# Altium footprint library huan_basic.PcbLib: 138 footprints (part 6 of 9)
Each footprint in its own frame and in the unit in brackets; x right, y up, seen from the top. Pads: shape width x height; smd on the part's side, far side on the other; paste and mask are expansions set on the pad; w line width, h text height; cw(c..) or ccw(c..) is an arc to the next point about the centre after c.
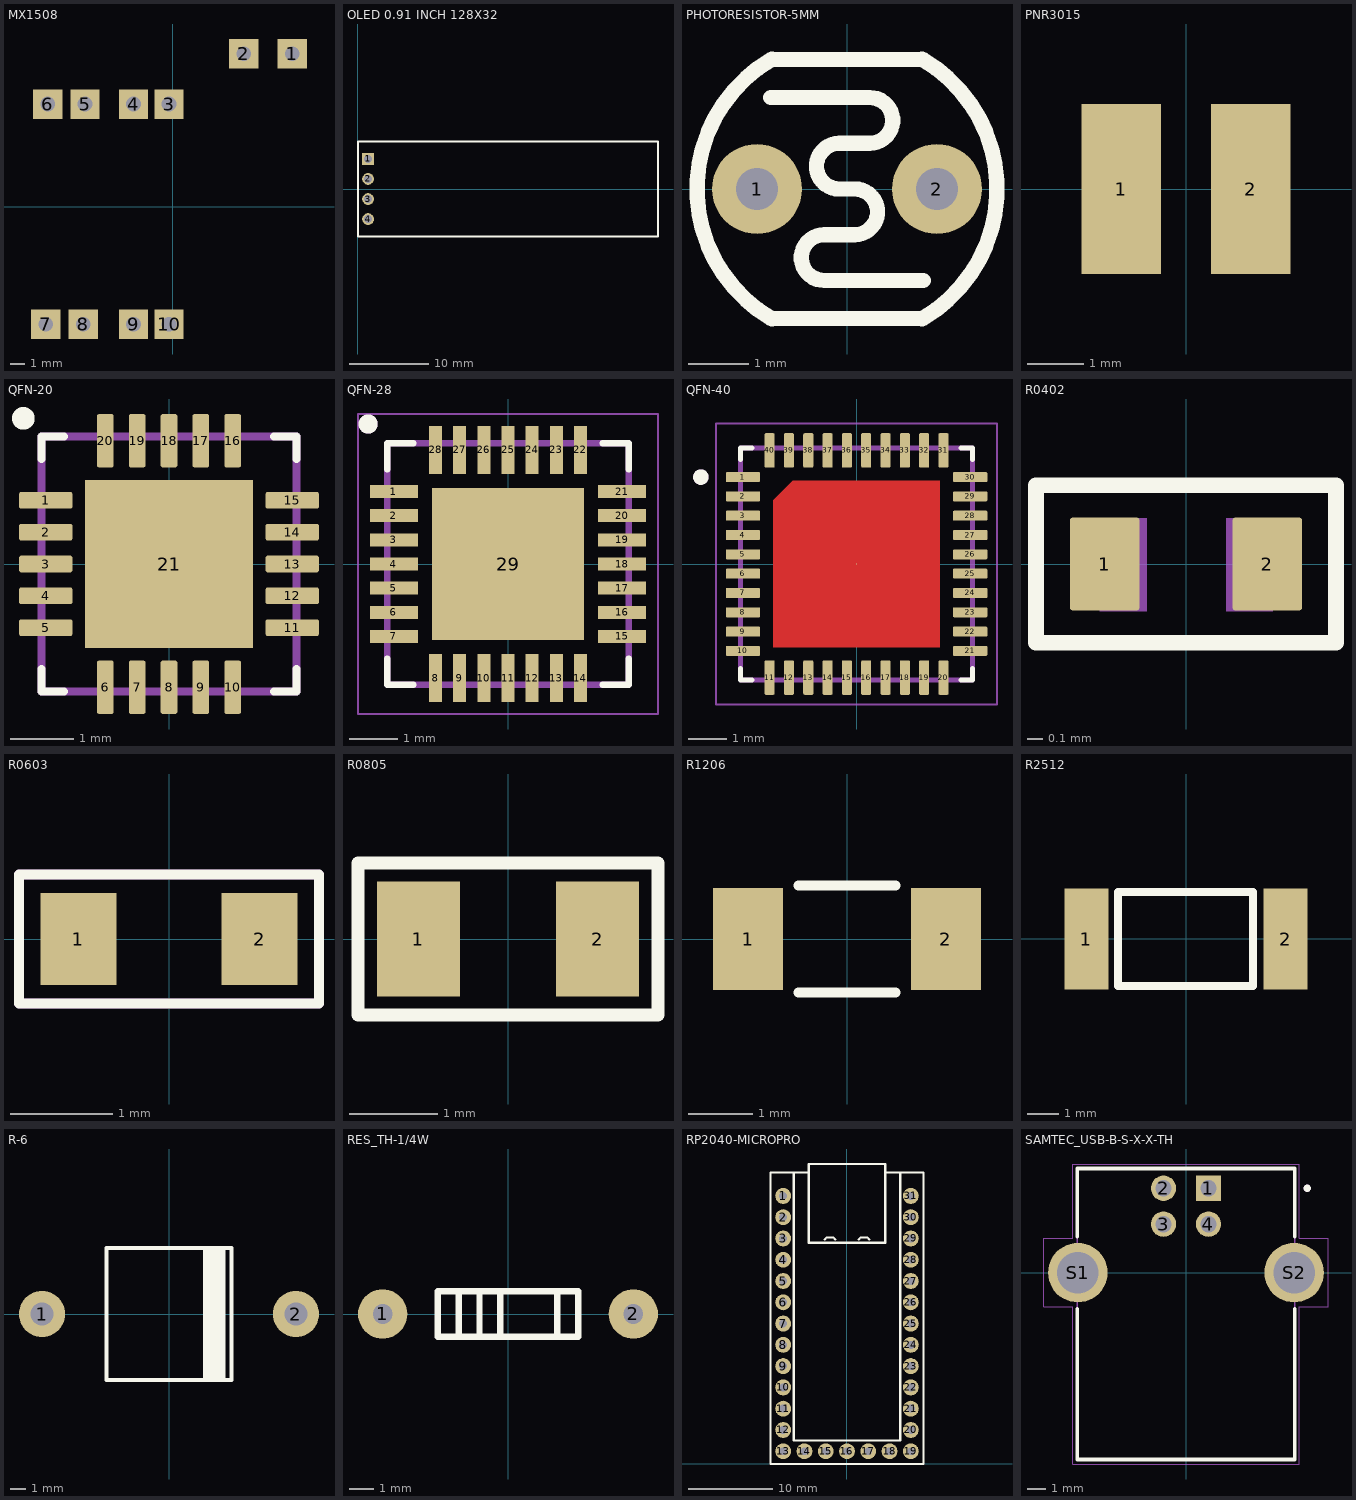
[diagram p5: the footprints below, top view; thin cyan lines are the x and y axes]

## MX1508 [mm]
pads (10):
  rect 2x2 hole 1: 1(8.128,10.414) 2(4.826,10.414) 3(-0.254,6.985) 4(-2.667,6.985) 5(-5.969,6.985) 6(-8.509,6.985) 7(-8.636,-8.001) 8(-6.096,-8.001) 9(-2.667,-8.001) 10(-0.254,-8.001)
3D body "MX1508.STEP": height 7.06, standoff -0.31, extent -10.6,-12.25 10.6,12.25

## OLED 0.91 INCH 128X32 [mm]
pads (4):
  rect 1.5x1.5 hole 1: 1(1.27,3.81)
  round 1.5 hole 1: 2(1.27,1.27) 3(1.27,-1.27) 4(1.27,-3.81)
Top Overlay:
  lines w0.254: 0,-6 0,6 38,6 38,-6 0,-6
3D body "OLED 128 x 32 Display Assembly.step": height 6, standoff -5.26, extent 0,-6 38,6

## PHOTORESISTOR-5MM [mm]
pads (2):
  round 1.5 hole 0.7: 1(-1.5,0) 2(1.5,0)
Top Overlay:
  lines w0.254: -1.27,-2.159 1.25,-2.159 ; -1.27,1.524 0.381,1.524 cw(c0.381,1.143) 0.381,0.762 -0.127,0.762 ccw(c-0.127,0.381) -0.127,0 0.127,0 cw(c0.127,-0.381) 0.127,-0.762 -0.381,-0.762 ccw(c-0.381,-1.143) -0.381,-1.524 1.27,-1.524 ; -1.25,-2.165 cw(c0,0) -1.25,2.165 ; -1.25,2.159 1.27,2.159 ; 1.25,-2.165 ccw(c0,0) 1.25,2.165
3D body "Accurate GL55 (No Glass).step": height 2.2, standoff -1.8, extent -2.55,-2.15 2.55,2.15

## PNR3015 [mm]
pads (2):
  rect 1.4x3 smd: 1(-1.143,0) 2(1.143,0)
3D body "PNR3015 SMD Power Inductor.STEP": height 1.45, standoff 0.09, extent -1.5,-1.5 1.5,1.5

## QFN-20 [mm]
pads (21):
  rrect25% 0.84x0.26 smd: 1(-1.935,1) 2(-1.935,0.5) 3(-1.935,0) 4(-1.935,-0.5) 5(-1.935,-1) 11(1.935,-1) 12(1.935,-0.5) 13(1.935,0) 14(1.935,0.5) 15(1.935,1)
  rrect25% 0.26x0.84 smd: 6(-1,-1.935) 7(-0.5,-1.935) 8(0,-1.935) 9(0.5,-1.935) 10(1,-1.935) 16(1,1.935) 17(0.5,1.935) 18(0,1.935) 19(-0.5,1.935) 20(-1,1.935)
  rect 2.63x2.63 smd paste-2: 21(0,0)
Top Overlay:
  circle w0.254: c-2.286,2.286 r0.051
  lines w0.127: -2,-1.65 -2,-2 -1.65,-2 ; -2,1.65 -2,2 -1.65,2 ; 1.65,-2 2,-2 2,-1.65 ; 1.65,2 2,2 2,1.65
Top Paste:
  region: 0.657,-0.8 -0.8,-0.8 -0.8,0.657 0.657,0.657
Mechanical 13:
  lines w0.127: -2,-2 2,-2 2,2 -2,2 -2,-2
3D body "step_temp.STEP": height 1, standoff 0, extent -2,-2 2,2

## QFN-28 [mm]
height 0.8
pads (29):
  rect 0.99x0.27 smd paste+0 mask+0.102: 1(-2.36,1.5) 2(-2.36,1) 3(-2.36,0.5) 4(-2.36,0) 5(-2.36,-0.5) 6(-2.36,-1) 7(-2.36,-1.5) 15(2.36,-1.5) 16(2.36,-1) 17(2.36,-0.5) 18(2.36,0) 19(2.36,0.5) 20(2.36,1) 21(2.36,1.5)
  rect 0.27x0.99 smd paste+0 mask+0.102: 8(-1.5,-2.36) 9(-1,-2.36) 10(-0.5,-2.36) 11(0,-2.36) 12(0.5,-2.36) 13(1,-2.36) 14(1.5,-2.36) 22(1.5,2.36) 23(1,2.36) 24(0.5,2.36) 25(0,2.36) 26(-0.5,2.36) 27(-1,2.36) 28(-1.5,2.36)
  rect 3.15x3.15 smd paste-0.597 mask+0.102: 29(0,0)
Top Overlay:
  circle w0.2: c-2.896,2.897 r0.1
  lines w0.127: -2.5,-1.955 -2.5,-2.5 -1.955,-2.5 ; -2.5,1.955 -2.5,2.5 -1.955,2.5 ; 1.955,-2.5 2.5,-2.5 2.5,-1.955 ; 1.955,2.5 2.5,2.5 2.5,1.955
Mechanical 13:
  circle w0.2: c-2.896,2.897 r0.1
  lines w0.127: -2.5,-2.5 -2.5,2.5 2.5,2.5 2.5,-2.5 -2.5,-2.5
Mechanical 15:
  lines w0.05: -3.105,-3.105 3.105,-3.105 3.105,3.105 -3.105,3.105 -3.105,-3.105
3D body "step_temp.STEP": height 0.8, standoff 0, extent -2.5,-2.5 2.5,2.5

## QFN-40 [mm]
pads (41):
  rrect25% 0.89x0.26 smd: 1(-2.94,2.25) 2(-2.94,1.75) 3(-2.94,1.25) 4(-2.94,0.75) 5(-2.94,0.25) 6(-2.94,-0.25) 7(-2.94,-0.75) 8(-2.94,-1.25) 9(-2.94,-1.75) 10(-2.94,-2.25) 21(2.94,-2.25) 22(2.94,-1.75) 23(2.94,-1.25) 24(2.94,-0.75) 25(2.94,-0.25) 26(2.94,0.25) 27(2.94,0.75) 28(2.94,1.25) 29(2.94,1.75) 30(2.94,2.25)
  rrect25% 0.26x0.89 smd: 11(-2.25,-2.94) 12(-1.75,-2.94) 13(-1.25,-2.94) 14(-0.75,-2.94) 15(-0.25,-2.94) 16(0.25,-2.94) 17(0.75,-2.94) 18(1.25,-2.94) 19(1.75,-2.94) 20(2.25,-2.94) 31(2.25,2.94) 32(1.75,2.94) 33(1.25,2.94) 34(0.75,2.94) 35(0.25,2.94) 36(-0.25,2.94) 37(-0.75,2.94) 38(-1.25,2.94) 39(-1.75,2.94) 40(-2.25,2.94)
  round 0.025 smd: 41(0,0)
Top Layer:
  region: -2.159,-2.159 -2.159,1.651 -1.651,2.159 2.159,2.159 2.159,-2.159
Top Overlay:
  circle w0.2: c-4.03,2.25 r0.1
  lines w0.127: -3,-2.7 -3,-3 -2.7,-3 ; -3,2.7 -3,3 -2.7,3 ; 2.7,-3 3,-3 3,-2.7 ; 2.7,3 3,3 3,2.7
Mechanical 13:
  circle w0.2: c-4.03,2.25 r0.1
  lines w0.127: -3,-3 -3,3 3,3 3,-3 -3,-3
Mechanical 15:
  lines w0.05: -3.635,-3.635 -3.635,3.635 3.635,3.635 3.635,-3.635 -3.635,-3.635
3D body "step_temp.STEP": height 1, standoff 0, extent -3,-3 3,3

## R0402 [mm]
pads (2):
  rrect10% 0.45x0.6 smd: 1(-0.523,0) 2(0.523,0)
Top Overlay:
  lines w0.1: -0.965,-0.508 0.584,-0.508 0.965,-0.508 0.965,0.178 0.965,0.508 -0.889,0.508 -0.965,0.508 -0.965,0.254 -0.965,-0.508
Mechanical 13:
  region: -0.254,-0.305 -0.554,-0.305 -0.554,0.295 -0.254,0.295
  region: 0.559,-0.305 0.259,-0.305 0.259,0.295 0.559,0.295
3D body "step_temp.STEP": height 0.4, standoff 0, extent -0.5,-0.25 0.5,0.25

## R0603 [mm]
pads (2):
  rect 0.75x0.9 smd: 1(-0.889,0) 2(0.889,0)
Top Overlay:
  lines w0.1: -1.473,-0.635 -1.473,0.635 1.473,0.635 1.473,-0.635 -1.473,-0.635
Mechanical 15:
  lines w0.1: -1.473,-0.635 -1.473,0.635 1.473,0.635 1.473,-0.635 -1.473,-0.635
3D body "CRCW0603.step": height 0.45, standoff 0, extent -0.775,-0.425 0.775,0.425

## R0805 [mm]
pads (2):
  rect 0.94x1.3 smd: 1(-1.016,0) 2(1.016,0)
Top Overlay:
  lines w0.15: -1.702,-0.864 1.702,-0.864 1.702,0.864 -1.702,0.864 -1.702,-0.864
3D body "CRCW0805.step": height 0.45, standoff 0, extent -1,-0.625 1,0.625

## R1206 [mm]
pads (2):
  rect 1.1x1.6 smd: 1(-1.549,0) 2(1.549,0)
Top Overlay:
  lines w0.15: -0.762,-0.838 0.762,-0.838 ; -0.762,0.838 0.762,0.838
3D body "CRCW1206.step": height 0.55, standoff 0, extent -1.6,-0.8 1.6,0.8

## R2512 [mm]
pads (2):
  rect 1.4x3.2 smd: 1(-3.175,0) 2(3.175,0)
Top Overlay:
  lines w0.254: -2.159,-1.499 2.134,-1.499 2.134,1.499 -2.159,1.499 -2.159,-1.499
3D body "Resistor_2512_Text.step": height 0.66, standoff 0.01, extent -3.15,-1.6 3.15,1.6

## R-6 [mm]
pads (2):
  round 3 hole 1.5: 1(-8.255,0) 2(8.255,0)
Top Overlay:
  rectangle: 2.22,-4.3 3.672,4.3
  lines w0.254: -4.064,-4.3 -4.064,4.3 4.064,4.3 4.064,-4.3 -4.064,-4.3
3D body "R-6_Min_size_650mil_rev1.0.STEP": height 9.6, standoff -3.6, extent -8.865,-4.3 8.865,4.3

## RES_TH-1/4W [mm]
pads (2):
  round 2 hole 0.8: 1(-5.08,0) 2(5.08,0)
Top Overlay:
  lines w0.254: -2,-0.917 -2,0.917 ; -1.156,-0.917 -1.156,0.917 ; -0.311,-0.917 -0.311,0.917 ; 0.816,-0.917 2.845,-0.917 2.845,0.917 0.816,0.917 ; 1.83,0.917 -2.845,0.917 -2.845,-0.917 2.201,-0.917 ; 2,-0.917 2,0.917
3D body "1.2MR 0.4.STEP": height 2.93, standoff -2.54, extent -5.385,-1.156 5.385,1.156

## RP2040-MICROPRO [mm]
pads (31):
  round 1.9 hole 0.94: 1(-7.62,32.004) 2(-7.62,29.464) 3(-7.62,26.924) 4(-7.62,24.384) 5(-7.62,21.844) 6(-7.62,19.304) 7(-7.62,16.764) 8(-7.62,14.224) 9(-7.62,11.684) 10(-7.62,9.144) 11(-7.62,6.604) 12(-7.62,4.064) 13(-7.62,1.524) 14(-5.08,1.524) 15(-2.54,1.524) 16(0,1.524) 17(2.54,1.524) 18(5.08,1.524) 19(7.62,1.524) 20(7.62,4.064) 21(7.62,6.604) 22(7.62,9.144) 23(7.62,11.684) 24(7.62,14.224) 25(7.62,16.764) 26(7.62,19.304) 27(7.62,21.844) 28(7.62,24.384) 29(7.62,26.924) 30(7.62,29.464) 31(7.62,32.004)
Top Overlay:
  lines w0.254: -6.35,34.798 -6.35,2.794 6.35,2.794 6.35,34.798 ; -4.572,34.798 -9.15,34.798 -9.15,0 9.15,0 9.15,34.798 4.572,34.798 ; -2.667,26.797 -2.413,27.051 -1.651,27.051 -1.397,26.797 ; 1.397,26.797 1.651,27.051 2.413,27.051 2.667,26.797 ; -4.572,26.416 -4.572,35.814 0,35.814 4.572,35.814 4.572,26.416 0,26.416 -4.572,26.416
3D body "Arduino Pro Micro USB Type C.step": height 6.76, standoff 2.1, extent -9.15,0 9.15,36.202
3D body "Header, Male, 2.54mm, 1x10.STEP": height 5.8, standoff -5.74, extent -8.89,7.874 -6.35,33.274
3D body "Header, Male, 2.54mm, 1x3.STEP": height 5.8, standoff -5.74, extent -8.89,0.254 -6.35,7.874
3D body "Header, Male, 2.54mm, 1x10.STEP": height 5.8, standoff -5.74, extent 6.35,7.874 8.89,33.274
3D body "Header, Male, 2.54mm, 1x3.STEP": height 5.8, standoff -5.74, extent 6.35,0.254 8.89,7.874
3D body "Header, Male, 2.54mm, 1x2.STEP": height 5.8, standoff -5.74, extent 1.27,0.254 6.35,2.794
3D body "Header, Male, 2.54mm, 1x3.STEP": height 5.8, standoff -5.74, extent -6.35,0.254 1.27,2.794

## SAMTEC_USB-B-S-X-X-TH [mm]
height 10.95
pads (6):
  rect 1.408x1.408 / inner round 1.408 / far side rect 1.408x1.408 hole 0.9: 1(1.25,4.7)
  round 1.408 hole 0.9: 2(-1.25,4.7) 3(-1.25,2.7) 4(1.25,2.7)
  round 3.316 hole 2.3: S1(-6.02,0) S2(6.02,0)
Top Overlay:
  circle w0.2: c6.75,4.7 r0.1
  lines w0.2: -6.05,-2.01 -6.05,-10.4 6.05,-10.4 6.05,-2.01 ; -6.05,2.01 -6.05,5.8 6.05,5.8 6.05,2.01
Mechanical 13:
  circle w0.2: c6.75,4.7 r0.1
  lines w0.1: -6.05,-10.4 6.05,-10.4 6.05,5.8 -6.05,5.8 -6.05,-10.4
Mechanical 15:
  lines w0.05: -7.93,-1.91 -6.3,-1.91 -6.3,-10.65 6.3,-10.65 6.3,-1.91 7.93,-1.91 7.93,1.91 6.3,1.91 6.3,6.05 -6.3,6.05 -6.3,1.91 -7.93,1.91 -7.93,-1.91
3D body "USB_B.STEP": height 11.17, standoff -3.67, extent -6.035,-10.312 6.035,5.588